# Altium schematic symbol library EEEFN2A100P.SchLib: 1 symbol
Pins are listed as number, name and electrical type; pins without a type are passive.

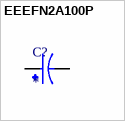
[diagram p0: symbol EEEFN2A100P]

## EEEFN2A100P
designator C?
CAP ALUM 10UF 20% 100V SMD; MF: Panasonic; MP: EEEFN2A100P; SnapEDA_Link: https://www.snapeda.com/parts/EEEFN2A100P/Panasonic/view-part/?ref=snap; Package: RADIAL-2 Panasonic; Value: *; Check_prices: https://www.snapeda.com/parts/EEEFN2A100P/Panasonic/view-part/?ref=eda
footprint CAP_EEEFN2A100P
pins: 1, 2